# Altium schematic symbol library D15S13A4PA00LF.SchLib: 1 symbol
Pins are listed as number, name and electrical type; pins without a type are passive.

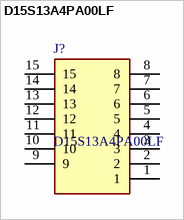
[diagram p0: symbol D15S13A4PA00LF]

## D15S13A4PA00LF
designator J?
15 Position D-Sub Receptacle, Female Sockets Connector 2 (DA, A) 300V -55C ~ 125C; Manufacturer_Name: Amphenol Communications Solutions; Geometry.Height: 13.86mm; Mouser Part Number: *; Mouser Price/Stock: *; Manufacturer_Part_Number: D15S13A4PA00LF; Datasheet Link: https://cdn.amphenol-cs.com/media/wysiwyg/files/drawing/c01-8646-0304.pdf
footprint D15S13A4PA00LF
pins: 1, 2, 3, 4, 5, 6, 7, 8, 9, 10, 11, 12, 13, 14, 15